# Altium footprint library PcbLib1.PcbLib: 69 footprints (part 5 of 5)
Each footprint in its own frame and in the unit in brackets; x right, y up, seen from the top. Pads: shape width x height; smd on the part's side, far side on the other; paste and mask are expansions set on the pad; w line width, h text height; cw(c..) or ccw(c..) is an arc to the next point about the centre after c.
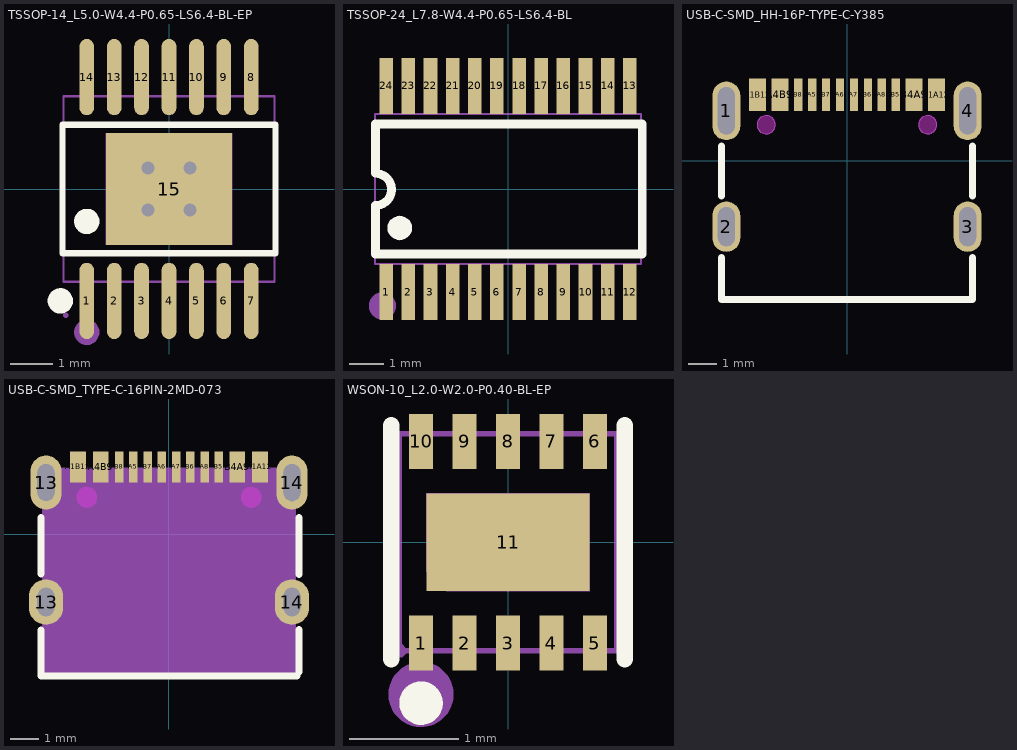
[diagram p4: the footprints below, top view; thin cyan lines are the x and y axes]

## TSSOP-14_L5.0-W4.4-P0.65-LS6.4-BL-EP [mm]
pads (15):
  oval 0.35x1.809 smd: 1(-1.95,-2.655) 2(-1.3,-2.655) 3(-0.65,-2.655) 4(0,-2.655) 5(0.65,-2.655) 6(1.3,-2.655) 7(1.95,-2.655) 8(1.95,2.655) 9(1.3,2.655) 10(0.65,2.655) 11(0,2.655) 12(-0.65,2.655) 13(-1.3,2.655) 14(-1.95,2.655)
  rect 3x2.65 smd: 15(0,0)
via 0.495,-0.495 diameter 0.61 hole 0.305
via -0.495,-0.495 diameter 0.61 hole 0.305
via -0.495,0.495 diameter 0.61 hole 0.305
via 0.495,0.495 diameter 0.61 hole 0.305
Top Overlay:
  circle w0.3: c-2.577,-2.655 r0.15
  circle w0.3: c-1.95,-0.769 r0.15
  lines w0.152: -2.526,-1.521 2.526,-1.521 2.526,1.521 -2.526,1.521 -2.526,-1.521
Mechanical 2:
  circle w0.3: c-1.95,-3.4 r0.15
Mechanical 6:
  lines w0.051: -2.5,-2.2 2.5,-2.2 2.5,2.2 -2.5,2.2 -2.5,-2.2
Mechanical 7:
  region: 1.825,2.37 1.825,1.94 2.075,1.94 2.075,2.37
  region: 1.175,2.37 1.175,1.94 1.425,1.94 1.425,2.37
  region: 0.525,2.37 0.525,1.94 0.775,1.94 0.775,2.37
  region: -0.125,2.37 -0.125,1.94 0.125,1.94 0.125,2.37
  region: -0.775,2.37 -0.775,1.94 -0.525,1.94 -0.525,2.37
  region: -1.425,2.37 -1.425,1.94 -1.175,1.94 -1.175,2.37
  region: -2.075,2.37 -2.075,1.94 -1.825,1.94 -1.825,2.37
  region: 1.825,-2.37 1.825,-1.94 2.075,-1.94 2.075,-2.37
  region: 1.175,-2.37 1.175,-1.94 1.425,-1.94 1.425,-2.37
  region: 0.525,-2.37 0.525,-1.94 0.775,-1.94 0.775,-2.37
  region: -0.125,-2.37 -0.125,-1.94 0.125,-1.94 0.125,-2.37
  region: -0.775,-2.37 -0.775,-1.94 -0.525,-1.94 -0.525,-2.37
  region: -1.425,-2.37 -1.425,-1.94 -1.175,-1.94 -1.175,-2.37
  region: -2.075,-2.37 -2.075,-1.94 -1.825,-1.94 -1.825,-2.37
Mechanical 8:
  region: -2.39,-3 -2.39,-3.025 -2.425,-3.06 -2.475,-3.06 -2.51,-3.025 -2.51,-3 -2.51,-2.975 -2.475,-2.94 -2.425,-2.94 -2.39,-2.975 -2.39,-3
Mechanical 9:
  region: -1.5,-1.325 -1.5,1.325 1.5,1.325 1.5,-1.325
  region: 1.825,3 1.825,2.36 2.075,2.36 2.075,3
  region: 1.175,3 1.175,2.36 1.425,2.36 1.425,3
  region: 0.525,3 0.525,2.36 0.775,2.36 0.775,3
  region: -0.125,3 -0.125,2.36 0.125,2.36 0.125,3
  region: -0.775,3 -0.775,2.36 -0.525,2.36 -0.525,3
  region: -1.425,3 -1.425,2.36 -1.175,2.36 -1.175,3
  region: -2.075,3 -2.075,2.36 -1.825,2.36 -1.825,3
  region: 1.825,-3 1.825,-2.36 2.075,-2.36 2.075,-3
  region: 1.175,-3 1.175,-2.36 1.425,-2.36 1.425,-3
  region: 0.525,-3 0.525,-2.36 0.775,-2.36 0.775,-3
  region: -0.125,-3 -0.125,-2.36 0.125,-2.36 0.125,-3
  region: -0.775,-3 -0.775,-2.36 -0.525,-2.36 -0.525,-3
  region: -1.425,-3 -1.425,-2.36 -1.175,-2.36 -1.175,-3
  region: -2.075,-3 -2.075,-2.36 -1.825,-2.36 -1.825,-3

## TSSOP-24_L7.8-W4.4-P0.65-LS6.4-BL [mm]
pads (24):
  rect 0.4x1.65 smd: 1(-3.575,-3.023) 2(-2.925,-3.023) 3(-2.275,-3.023) 4(-1.625,-3.023) 5(-0.975,-3.023) 6(-0.325,-3.023) 7(0.325,-3.023) 8(0.975,-3.023) 9(1.625,-3.023) 10(2.275,-3.023) 11(2.925,-3.023) 12(3.575,-3.023) 13(3.575,3.023) 14(2.925,3.023) 15(2.275,3.023) 16(1.625,3.023) 17(0.975,3.023) 18(0.325,3.023) 19(-0.325,3.023) 20(-0.975,3.023) 21(-1.625,3.023) 22(-2.275,3.023) 23(-2.925,3.023) 24(-3.575,3.023)
Top Overlay:
  region: -3.529,-1.143 -3.52,-1.064 -3.494,-0.989 -3.452,-0.922 -3.396,-0.866 -3.329,-0.824 -3.254,-0.798 -3.175,-0.789 -3.096,-0.798 -3.021,-0.824 -2.954,-0.866 -2.898,-0.922 -2.856,-0.989 -2.83,-1.064 -2.821,-1.143 -2.83,-1.222 -2.856,-1.297 -2.898,-1.364 -2.954,-1.42 -3.021,-1.462 -3.096,-1.488 -3.175,-1.497 -3.254,-1.488 -3.329,-1.462 -3.396,-1.42 -3.452,-1.364 -3.494,-1.297 -3.52,-1.222
  lines w0.254: -3.886,0.457 cw(c-3.886,-0.013) -3.886,-0.483 -3.886,-1.753 -3.886,-1.905 3.937,-1.905 3.937,1.905 -3.886,1.905 -3.886,1.753 -3.886,0.483
Mechanical 2:
  circle w0.4: c-3.683,-3.429 r0.2
Mechanical 6:
  lines w0.051: -3.9,-2.2 -3.9,2.2 3.9,2.2 3.9,-2.2 -3.9,-2.2
Mechanical 7:
  region: -0.225,2.588 -0.425,2.588 -0.425,2.188 -0.225,2.188
  region: -0.875,2.588 -1.075,2.588 -1.075,2.188 -0.875,2.188
  region: -1.525,2.588 -1.725,2.588 -1.725,2.188 -1.525,2.188
  region: -2.175,2.588 -2.375,2.588 -2.375,2.188 -2.175,2.188
  region: -2.825,2.588 -3.025,2.588 -3.025,2.188 -2.825,2.188
  region: -3.475,2.588 -3.675,2.588 -3.675,2.188 -3.475,2.188
  region: 3.675,2.588 3.475,2.588 3.475,2.188 3.675,2.188
  region: 3.025,2.588 2.825,2.588 2.825,2.188 3.025,2.188
  region: 2.375,2.588 2.175,2.588 2.175,2.188 2.375,2.188
  region: 1.725,2.588 1.525,2.588 1.525,2.188 1.725,2.188
  region: 1.075,2.588 0.875,2.588 0.875,2.188 1.075,2.188
  region: 0.425,2.588 0.225,2.588 0.225,2.188 0.425,2.188
  region: 0.225,-2.588 0.425,-2.588 0.425,-2.188 0.225,-2.188
  region: 0.875,-2.588 1.075,-2.588 1.075,-2.188 0.875,-2.188
  region: 1.525,-2.588 1.725,-2.588 1.725,-2.188 1.525,-2.188
  region: 2.175,-2.588 2.375,-2.588 2.375,-2.188 2.175,-2.188
  region: 2.825,-2.588 3.025,-2.588 3.025,-2.188 2.825,-2.188
  region: 3.475,-2.588 3.675,-2.588 3.675,-2.188 3.475,-2.188
  region: -3.675,-2.588 -3.475,-2.588 -3.475,-2.188 -3.675,-2.188
  region: -3.025,-2.588 -2.825,-2.588 -2.825,-2.188 -3.025,-2.188
  region: -2.375,-2.588 -2.175,-2.588 -2.175,-2.188 -2.375,-2.188
  region: -1.725,-2.588 -1.525,-2.588 -1.525,-2.188 -1.725,-2.188
  region: -1.075,-2.588 -0.875,-2.588 -0.875,-2.188 -1.075,-2.188
  region: -0.425,-2.588 -0.225,-2.588 -0.225,-2.188 -0.425,-2.188
Mechanical 8:
  region: -3.84,-3.186 -3.84,-3.211 -3.875,-3.246 -3.925,-3.246 -3.96,-3.211 -3.96,-3.186 -3.96,-3.161 -3.925,-3.126 -3.875,-3.126 -3.84,-3.161 -3.84,-3.186
Mechanical 9:
  region: -0.225,2.586 -0.425,2.586 -0.425,3.186 -0.225,3.186
  region: -0.875,2.586 -1.075,2.586 -1.075,3.186 -0.875,3.186
  region: -1.525,2.586 -1.725,2.586 -1.725,3.186 -1.525,3.186
  region: -2.175,2.586 -2.375,2.586 -2.375,3.186 -2.175,3.186
  region: -2.825,2.586 -3.025,2.586 -3.025,3.186 -2.825,3.186
  region: -3.475,2.586 -3.675,2.586 -3.675,3.186 -3.475,3.186
  region: 3.675,2.586 3.475,2.586 3.475,3.186 3.675,3.186
  region: 3.025,2.586 2.825,2.586 2.825,3.186 3.025,3.186
  region: 2.375,2.586 2.175,2.586 2.175,3.186 2.375,3.186
  region: 1.725,2.586 1.525,2.586 1.525,3.186 1.725,3.186
  region: 1.075,2.586 0.875,2.586 0.875,3.186 1.075,3.186
  region: 0.425,2.586 0.225,2.586 0.225,3.186 0.425,3.186
  region: 0.225,-2.586 0.425,-2.586 0.425,-3.186 0.225,-3.186
  region: 0.875,-2.586 1.075,-2.586 1.075,-3.186 0.875,-3.186
  region: 1.525,-2.586 1.725,-2.586 1.725,-3.186 1.525,-3.186
  region: 2.175,-2.586 2.375,-2.586 2.375,-3.186 2.175,-3.186
  region: 2.825,-2.586 3.025,-2.586 3.025,-3.186 2.825,-3.186
  region: 3.475,-2.586 3.675,-2.586 3.675,-3.186 3.475,-3.186
  region: -3.675,-2.586 -3.475,-2.586 -3.475,-3.186 -3.675,-3.186
  region: -3.025,-2.586 -2.825,-2.586 -2.825,-3.186 -3.025,-3.186
  region: -2.375,-2.586 -2.175,-2.586 -2.175,-3.186 -2.375,-3.186
  region: -1.725,-2.586 -1.525,-2.586 -1.525,-3.186 -1.725,-3.186
  region: -1.075,-2.586 -0.875,-2.586 -0.875,-3.186 -1.075,-3.186
  region: -0.425,-2.586 -0.225,-2.586 -0.225,-3.186 -0.425,-3.186

## USB-C-SMD_HH-16P-TYPE-C-Y385 [mm]
pads (16):
  oval 1x2.1 hole 0.6 slot 1.7 at 90 deg copper offset 0,0 paste-2539.97 mask+0.051: 1(-4.32,1.787) 4(4.32,1.787)
  oval 1x1.8 hole 0.6 slot 1.4 at 90 deg paste-2539.97 mask+0.051: 2(-4.32,-2.363) 3(4.32,-2.363)
  rect 0.6x1.15 smd paste+0 mask+0.05: A1B12(-3.2,2.363) A4B9(-2.4,2.363) B1A12(3.2,2.363) B4A9(2.4,2.363)
  rect 0.3x1.15 smd paste+0 mask+0.051: A5(-1.25,2.363) A6(-0.25,2.363) A7(0.25,2.363) A8(1.25,2.363) B5(1.75,2.363) B6(0.75,2.363) B7(-0.75,2.363) B8(-1.75,2.363)
Top Overlay:
  lines w0.254: -4.5,-3.471 -4.5,-4.962 4.5,-4.962 4.5,-3.471 ; -4.5,-1.254 -4.5,0.529 ; 4.5,-1.254 4.5,0.529
Keep-Out Layer:
  board cut-out: 3.215,1.287 3.215,1.223 3.166,1.103 3.074,1.012 2.955,0.962 2.825,0.962 2.706,1.012 2.615,1.103 2.565,1.223 2.565,1.287 2.565,1.352 2.615,1.471 2.706,1.563 2.825,1.612 2.955,1.612 3.074,1.563 3.166,1.471 3.215,1.352 3.215,1.287
  board cut-out: -2.565,1.287 -2.565,1.223 -2.614,1.103 -2.706,1.012 -2.825,0.962 -2.955,0.962 -3.074,1.012 -3.166,1.103 -3.215,1.223 -3.215,1.287 -3.215,1.352 -3.166,1.471 -3.074,1.563 -2.955,1.612 -2.825,1.612 -2.706,1.563 -2.614,1.471 -2.565,1.352 -2.565,1.287
Keep-Out Layer:
  circle w0.003: c2.89,1.287 r0.325
  circle w0.003: c-2.89,1.287 r0.325
  region: 3.215,1.287 3.206,1.21 3.178,1.136 3.133,1.072 3.075,1.02 3.005,0.984 2.929,0.965 2.851,0.965 2.775,0.984 2.705,1.02 2.647,1.072 2.602,1.136 2.574,1.21 2.565,1.287 2.574,1.365 2.602,1.438 2.647,1.503 2.705,1.555 2.775,1.591 2.851,1.61 2.929,1.61 3.005,1.591 3.075,1.555 3.133,1.503 3.178,1.438 3.206,1.365
  region: 3.215,1.287 3.215,1.223 3.166,1.103 3.074,1.012 2.955,0.962 2.825,0.962 2.706,1.012 2.615,1.103 2.565,1.223 2.565,1.287 2.565,1.352 2.615,1.471 2.706,1.563 2.825,1.612 2.955,1.612 3.074,1.563 3.166,1.471 3.215,1.352 3.215,1.287
  region: -2.565,1.287 -2.574,1.21 -2.602,1.136 -2.647,1.072 -2.705,1.02 -2.775,0.984 -2.851,0.965 -2.929,0.965 -3.005,0.984 -3.075,1.02 -3.133,1.072 -3.178,1.136 -3.206,1.21 -3.215,1.287 -3.206,1.365 -3.178,1.438 -3.133,1.503 -3.075,1.555 -3.005,1.591 -2.929,1.61 -2.851,1.61 -2.775,1.591 -2.705,1.555 -2.647,1.503 -2.602,1.438 -2.574,1.365
  region: -2.565,1.287 -2.565,1.223 -2.614,1.103 -2.706,1.012 -2.825,0.962 -2.955,0.962 -3.074,1.012 -3.166,1.103 -3.215,1.223 -3.215,1.287 -3.215,1.352 -3.166,1.471 -3.074,1.563 -2.955,1.612 -2.825,1.612 -2.706,1.563 -2.614,1.471 -2.565,1.352 -2.565,1.287
Mechanical 1:
  circle w0.003: c2.89,1.287 r0.325
  circle w0.003: c-2.89,1.287 r0.325
Mechanical 11:
  region: -4.44,2.265 -4.44,2.252 -4.458,2.235 -4.483,2.235 -4.5,2.252 -4.5,2.265 -4.5,2.277 -4.483,2.295 -4.458,2.295 -4.44,2.277 -4.44,2.265

## USB-C-SMD_TYPE-C-16PIN-2MD-073 [mm]
pads (16):
  oval 1.2x1.6 hole 0.6 slot 1 at 90 deg paste-2539.97 mask+0.05: 13(-4.325,-2.375) 14(4.325,-2.375)
  oval 1.1x1.9 hole 0.6 slot 1.3 at 90 deg paste-2539.97 mask+0.05: 13(-4.325,1.825) 14(4.325,1.825)
  rect 0.55x1.1 smd paste+0 mask+0.05: A1B12(-3.2,2.375) A4B9(-2.4,2.375) B1A12(3.2,2.375) B4A9(2.4,2.375)
  rect 0.3x1.1 smd paste+0 mask+0.05: A5(-1.25,2.375) A6(-0.25,2.375) A7(0.25,2.375) A8(1.25,2.375) B5(1.75,2.375) B6(0.75,2.375) B7(-0.75,2.375) B8(-1.75,2.375)
Top Overlay:
  lines w0.254: -4.5,-3.356 -4.5,-4.975 4.5,-4.975 ; -4.5,-1.394 -4.5,0.594 ; 4.572,-4.826 4.572,-3.353 ; 4.572,-1.397 4.572,0.597
Keep-Out Layer:
  board cut-out: 3.24,1.305 3.24,1.235 3.187,1.107 3.088,1.008 2.96,0.955 2.821,0.955 2.692,1.008 2.593,1.107 2.54,1.235 2.54,1.305 2.54,1.375 2.593,1.503 2.692,1.602 2.821,1.655 2.96,1.655 3.088,1.602 3.187,1.503 3.24,1.375 3.24,1.305
  board cut-out: -2.54,1.305 -2.54,1.235 -2.593,1.107 -2.692,1.008 -2.82,0.955 -2.96,0.955 -3.088,1.008 -3.187,1.107 -3.24,1.235 -3.24,1.305 -3.24,1.375 -3.187,1.503 -3.088,1.602 -2.96,1.655 -2.82,1.655 -2.692,1.602 -2.593,1.503 -2.54,1.375 -2.54,1.305
Keep-Out Layer:
  circle w0.003: c2.89,1.305 r0.35
  circle w0.003: c-2.89,1.305 r0.35
  region: 3.24,1.305 3.231,1.227 3.205,1.153 3.164,1.087 3.108,1.031 3.042,0.99 2.968,0.964 2.89,0.955 2.812,0.964 2.738,0.99 2.672,1.031 2.616,1.087 2.575,1.153 2.549,1.227 2.54,1.305 2.549,1.383 2.575,1.457 2.616,1.523 2.672,1.579 2.738,1.62 2.812,1.646 2.89,1.655 2.968,1.646 3.042,1.62 3.108,1.579 3.164,1.523 3.205,1.457 3.231,1.383
  region: 3.24,1.305 3.24,1.235 3.187,1.107 3.088,1.008 2.96,0.955 2.821,0.955 2.692,1.008 2.593,1.107 2.54,1.235 2.54,1.305 2.54,1.375 2.593,1.503 2.692,1.602 2.821,1.655 2.96,1.655 3.088,1.602 3.187,1.503 3.24,1.375 3.24,1.305
  region: -2.54,1.305 -2.549,1.227 -2.575,1.153 -2.616,1.087 -2.672,1.031 -2.738,0.99 -2.812,0.964 -2.89,0.955 -2.968,0.964 -3.042,0.99 -3.108,1.031 -3.164,1.087 -3.205,1.153 -3.231,1.227 -3.24,1.305 -3.231,1.383 -3.205,1.457 -3.164,1.523 -3.108,1.579 -3.042,1.62 -2.968,1.646 -2.89,1.655 -2.812,1.646 -2.738,1.62 -2.672,1.579 -2.616,1.523 -2.575,1.457 -2.549,1.383
  region: -2.54,1.305 -2.54,1.235 -2.593,1.107 -2.692,1.008 -2.82,0.955 -2.96,0.955 -3.088,1.008 -3.187,1.107 -3.24,1.235 -3.24,1.305 -3.24,1.375 -3.187,1.503 -3.088,1.602 -2.96,1.655 -2.82,1.655 -2.692,1.602 -2.593,1.503 -2.54,1.375 -2.54,1.305
Mechanical 1:
  circle w0.003: c2.89,1.305 r0.35
  circle w0.003: c-2.89,1.305 r0.35
Mechanical 5:
  circle w0.25: c2.89,1.305 r0.125
  circle w0.25: c-2.89,1.305 r0.125
Mechanical 9:
  region: -4.45,-5.001 -4.45,2.349 4.45,2.349 4.45,-5.001
Mechanical 11:
  region: -4.42,2.649 -4.42,2.637 -4.438,2.619 -4.462,2.619 -4.48,2.637 -4.48,2.649 -4.48,2.662 -4.462,2.679 -4.438,2.679 -4.42,2.662 -4.42,2.649
Mechanical 12:
  region: -4.475,-1.975 -4.175,-1.975 -4.175,-2.775 -4.475,-2.775
  region: 4.175,-1.975 4.475,-1.975 4.475,-2.775 4.175,-2.775
  region: 4.175,2.375 4.475,2.375 4.475,1.275 4.175,1.275
  region: -4.45,2.349 -4.2,2.349 -4.2,1.249 -4.45,1.249
  region: 3,2.649 3.4,2.649 3.4,1.799 3,1.799
  region: 2.2,2.649 2.6,2.649 2.6,1.799 2.2,1.799
  region: -2.6,2.649 -2.2,2.649 -2.2,1.799 -2.6,1.799
  region: -3.4,2.649 -3,2.649 -3,1.799 -3.4,1.799
  region: 1.65,2.649 1.85,2.649 1.85,1.799 1.65,1.799
  region: 1.15,2.649 1.35,2.649 1.35,1.799 1.15,1.799
  region: 0.65,2.649 0.85,2.649 0.85,1.799 0.65,1.799
  region: 0.15,2.649 0.35,2.649 0.35,1.799 0.15,1.799
  region: -0.35,2.649 -0.15,2.649 -0.15,1.799 -0.35,1.799
  region: -1.35,2.649 -1.15,2.649 -1.15,1.799 -1.35,1.799
  region: -0.85,2.649 -0.65,2.649 -0.65,1.799 -0.85,1.799
  region: -1.85,2.649 -1.65,2.649 -1.65,1.799 -1.85,1.799

## WSON-10_L2.0-W2.0-P0.40-BL-EP [mm]
pads (11):
  rect 0.224x0.505 smd: 1(-0.8,-0.928) 2(-0.4,-0.928) 3(0,-0.928) 4(0.4,-0.928) 5(0.8,-0.928) 6(0.8,0.928) 7(0.4,0.928) 8(0,0.928) 9(-0.4,0.928) 10(-0.8,0.928)
  rect 1.5x0.9 smd: 11(0,0)
Top Overlay:
  circle w0.2: c-0.8,-1.48 r0.1
  lines w0.152: -1.076,-1.076 -1.076,1.076 ; 1.076,-1.076 1.076,1.076
Mechanical 2:
  circle w0.3: c-0.8,-1.4 r0.15
Mechanical 6:
  lines w0.051: -1,-1 -1,1 1,1 1,-1 -1,-1
Mechanical 8:
  region: -0.94,-1 -0.94,-1.025 -0.975,-1.06 -1.025,-1.06 -1.06,-1.025 -1.06,-1 -1.06,-0.975 -1.025,-0.94 -0.975,-0.94 -0.94,-0.975 -0.94,-1
Mechanical 9:
  region: -0.9,-1 -0.9,-0.7 -0.7,-0.7 -0.7,-1
  region: -0.5,-1 -0.5,-0.7 -0.3,-0.7 -0.3,-1
  region: -0.1,-1 -0.1,-0.7 0.1,-0.7 0.1,-1
  region: 0.3,-1 0.3,-0.7 0.5,-0.7 0.5,-1
  region: 0.7,-1 0.7,-0.7 0.9,-0.7 0.9,-1
  region: -0.9,1 -0.9,0.7 -0.7,0.7 -0.7,1
  region: -0.5,1 -0.5,0.7 -0.3,0.7 -0.3,1
  region: -0.1,1 -0.1,0.7 0.1,0.7 0.1,1
  region: 0.3,1 0.3,0.7 0.5,0.7 0.5,1
  region: 0.7,1 0.7,0.7 0.9,0.7 0.9,1
  region: -0.75,-0.27 -0.75,0.45 0.75,0.45 0.75,-0.45 -0.57,-0.45